# Altium footprint library pptc.PcbLib: 4 footprints
Each footprint in its own frame and in the unit in brackets; x right, y up, seen from the top. Pads: shape width x height; smd on the part's side, far side on the other; paste and mask are expansions set on the pad; w line width, h text height; cw(c..) or ccw(c..) is an arc to the next point about the centre after c.
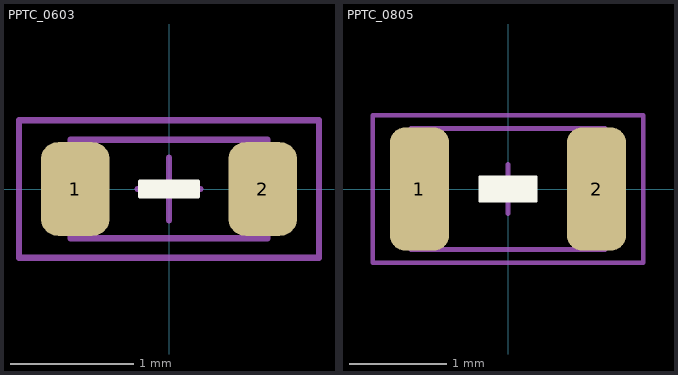
[diagram p0: the footprints below, top view; thin cyan lines are the x and y axes]

## PPTC_0603 [mil]
height 17.72
pads (2):
  rrect50% 22x30 smd: 1(-30,0) 2(30,0)
Top Overlay:
  region: 9.5,-2.5 -9.5,-2.5 -9.5,2.5 9.5,2.5
  lines w1: -9.5,-2.5 9.5,-2.5 9.5,2.5 -9.5,2.5 -9.5,-2.5
Mechanical 13:
  lines w2: -10,0 10,0 ; 0,-10 0,10 ; -31.5,-15.75 31.5,-15.75 31.5,15.75 -31.5,15.75 -31.5,-15.75
Top Component:
  lines w2: -48,-22 -48,22 48,22 48,-22 -48,-22
  text ".Designator" at -24,-16 h60
3D body "User Library-ptc06032-1.step": height 29.72, standoff 0, extent -31.49,-14.76 31.5,14.77

## PPTC_0805 [mil]
height 23.62
pads (2):
  rrect50% 24x50 smd: 1(-36,0) 2(36,0)
Top Overlay:
  region: -11.5,5 11.5,5 11.5,-5 -11.5,-5
  lines w1: -11.5,-5 11.5,-5 11.5,5 -11.5,5 -11.5,-5
Mechanical 13:
  lines w2: -10,0 10,0 ; 0,-10 0,10 ; -39.37,-24.61 39.37,-24.61 39.37,24.61 -39.37,24.61 -39.37,-24.61
Top Component:
  lines w2: -55,-30 -55,30 55,30 55,-30 -55,-30
  text ".Designator" at -32,-22 h80
3D body "User Library-fuse0805L050WR.step": height 49, standoff 0, extent -43.49,-29.49 43.51,29.51

## PPTC_5023 [mil]
Top Component:
  text ".Designator" at -41,-28 h100
3D body "User Library-MF-SMDF050.step": height 41.34, standoff -1.97, extent -106.29,-96.45 106.3,96.46

## PPTC_TH_RUEF400. [mil]
Top Component:
  text ".Designator" at -41,-27 h100
3D body "User Library-TE_CONNECTIVITY_RUEF400.step": height 877.95, standoff -314.96, extent -275.58,-55.35 275.6,55.36